# Altium schematic symbol library BQ7692006PW.SchLib: 1 symbol
Pins are listed as number, name and electrical type; pins without a type are passive.

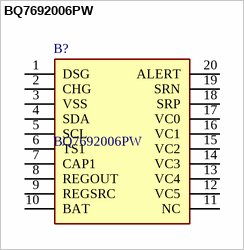
[diagram p0: symbol BQ7692006PW]

## BQ7692006PW
designator B?
3 to 5-Series Cell Li-Ion and Li-Phosphate Battery Monitor (bq76940 Family); Manufacturer_Name: Texas Instruments; Geometry.Height: 1.2mm; Mouser Part Number: 595-BQ7692006PW; Mouser Price/Stock: https://www.mouser.co.uk/ProductDetail/Texas-Instruments/BQ7692006PW?qs=MJut%252BdqOEgjXPi0Ty9wSKA%3D%3D; Manufacturer_Part_Number: BQ7692006PW; Datasheet Link: http://www.ti.com/lit/ds/symlink/bq76920.pdf
footprint SOP65P640X120-20N
pins: 1 DSG, 2 CHG, 3 VSS, 4 SDA, 5 SCL, 6 TS1, 7 CAP1, 8 REGOUT, 9 REGSRC, 10 BAT, 11 NC, 12 VC5, 13 VC4, 14 VC3, 15 VC2, 16 VC1, 17 VC0, 18 SRP, 19 SRN, 20 ALERT